# Altium footprint library ATK-DNN647_V1.0.PcbLib: 73 footprints (part 4 of 5)
Each footprint in its own frame and in the unit in brackets; x right, y up, seen from the top. Pads: shape width x height; smd on the part's side, far side on the other; paste and mask are expansions set on the pad; w line width, h text height; cw(c..) or ccw(c..) is an arc to the next point about the centre after c.
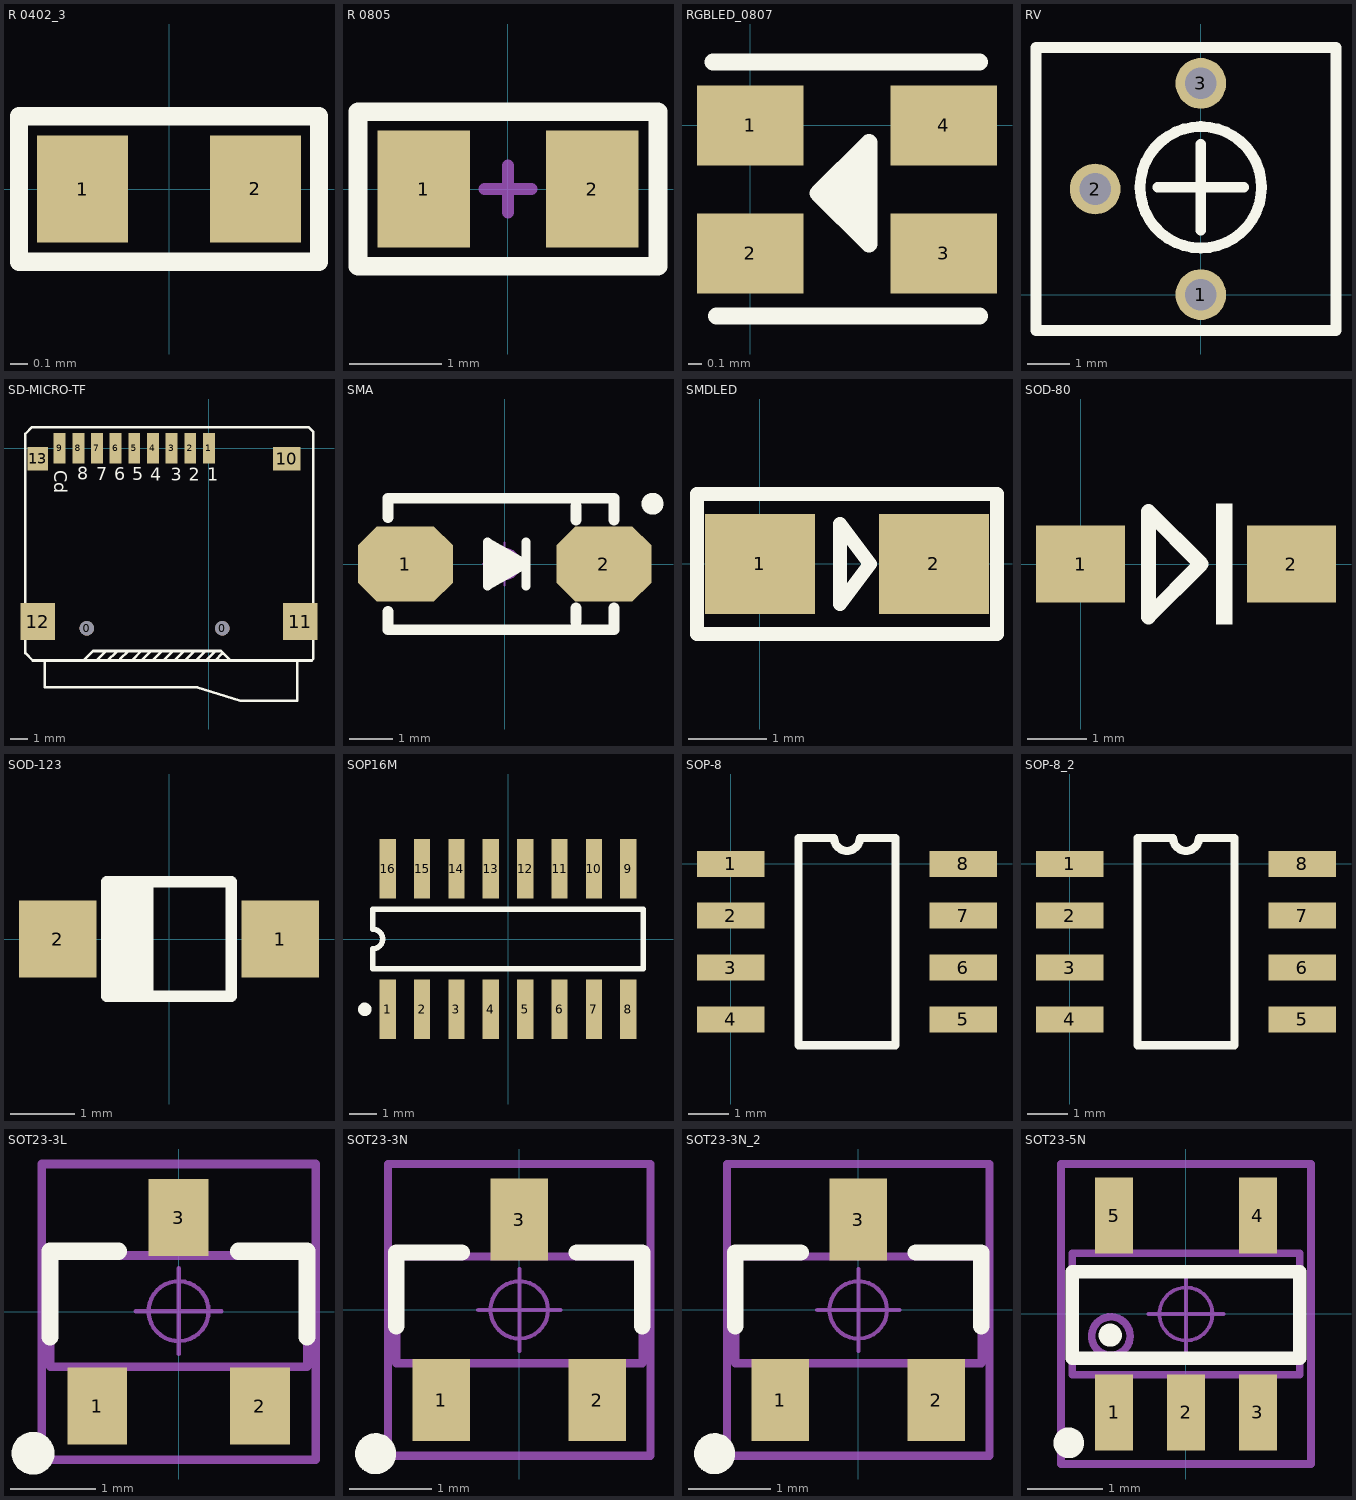
[diagram p3: the footprints below, top view; thin cyan lines are the x and y axes]

## R 0402_3 [mil]
pads (2):
  rect 20x23.62 smd mask+2: 1(-19,0) 2(19,0)
Top Overlay:
  lines w4: 7,-16 33,-16 33,16 7,16 ; 8,16 -33,16 -33,-16 9,-16
3D body "R0402.STEP": height 13.78, standoff 0, extent -19.69,-9.84 19.69,9.84

## R 0805 [mm] "1/8W贴片电阻"
pads (2):
  rect 1x1.27 smd: 1(-0.914,0) 2(0.914,0)
Top Overlay:
  lines w0.203: 0.406,-0.838 1.626,-0.838 1.626,0.838 0.406,0.838 ; 0.483,0.838 -1.626,0.838 -1.626,-0.838 0.533,-0.838
Mechanical 15:
  lines w0.127: -0.254,0 0.254,0 ; 0,-0.254 0,0.254
3D body "R0805.STEP": height 0.55, standoff 0, extent -0.873,-0.636 1.127,0.624

## RGBLED_0807 [mm] "0807, RGBLED, WS2812"
pads (4):
  rect 0.8x0.6 smd: 1(0,0) 2(0,-0.96) 3(1.45,-0.96) 4(1.45,0)
Top Overlay:
  region: 0.508,-0.508 0.889,-0.889 0.889,-0.127
  lines w0.127: -0.279,0.476 1.721,0.476 ; -0.254,-1.429 1.721,-1.429 ; 0.508,-0.508 0.889,-0.889 0.889,-0.127 0.508,-0.508

## RV [mm]
pads (3):
  round 1.2 hole 0.75: 1(0,0) 2(-2.5,2.5) 3(0,5)
Top Overlay:
  circle w0.254: c0,2.54 r1.437
  lines w0.254: -1.016,2.54 1.016,2.54 ; 0,1.524 0,3.556 ; -3.9,-0.85 3.2,-0.85 3.2,5.85 0,5.85 -3.9,5.85 -3.9,-0.85

## SD-MICRO-TF [mm]
pads (15):
  round 0.85 hole 0.85 unplated: 0(-7.2,-10.627) 0(0.8,-10.627)
  rect 0.7x1.8 smd: 1(0,0) 2(-1.1,0) 3(-2.2,0) 4(-3.3,0) 5(-4.4,0) 6(-5.5,0) 7(-6.6,0) 8(-7.7,0) 9(-8.8,0)
  rect 1.6x1.4 smd: 10(4.6,-0.627)
  rect 2.032x2.2 smd: 11(5.4,-10.227) 12(-10.1,-10.227)
  rect 1.2x1.4 smd: 13(-10.1,-0.627)
Top Overlay:
  lines w0.152: -9.677,-12.522 -9.677,-14.097 -0.686,-14.097 ; -6.629,-12.522 -6.096,-11.989 -6.096,-11.963 ; -5.969,-12.522 -5.461,-12.014 -5.461,-11.963 ; -5.232,-12.522 -5.232,-12.446 -4.75,-11.963 ; -4.547,-12.522 -3.988,-11.963 -3.962,-11.963 ; -3.962,-12.522 -3.429,-11.989 -3.429,-11.963 ; -3.327,-12.522 -2.769,-11.963 -2.667,-11.963 ; -2.667,-12.522 -2.108,-11.963 -2.083,-11.963 ; -2.032,-12.522 -1.499,-11.989 -1.499,-11.963 ; -1.397,-12.522 -0.838,-11.963 -0.711,-11.963 ; -0.762,-12.522 -0.203,-11.963 -0.178,-11.963 ; -0.711,-14.097 1.854,-14.91 5.207,-14.91 5.207,-12.548 ; -0.178,-12.522 0.381,-11.963 ; 0.381,-12.522 0.787,-12.116 0.864,-12.116 ; -10.389,-12.522 -7.391,-12.522 -6.833,-11.963 0.711,-11.963 1.27,-12.522 6.071,-12.522 ; -10.389,-12.522 6.071,-12.522 ; -10.389,-12.522 -10.82,-12.09 -10.82,0.855 -10.425,1.25 5.875,1.25 6.172,0.953 6.172,-12.421 6.071,-12.522
  text "Cd" at -9.119,-1.295 h0.76
  text "8" at -7.772,-1.854 h0.76
  text "7" at -6.655,-1.88 h0.76
  text "6" at -5.588,-1.88 h0.76
  text "5" at -4.521,-1.88 h0.76
  text "4" at -3.454,-1.905 h0.76
  text "3" at -2.261,-1.905 h0.76
  text "2" at -1.194,-1.905 h0.76
  text "1" at -0.102,-1.93 h0.76
3D body "sdcard.STEP": height 1.8, standoff -0.7, extent -10.372,-14.852 5.902,0.342

## SMA [mm] "4.5x2.6*2.2mm（长宽高，不包括引脚）"
height 2.54
pads (2):
  oct 2.2x1.75 smd: 1(-2.3,0) 2(2.3,0)
Top Overlay:
  circle w0.254: c3.429,1.397 r0.127
  lines w0.203: 0.494,-0.508 0.494,0.508 ; -0.395,-0.508 0.494,0 -0.395,0.508 -0.395,-0.508
  lines w0.254: -2.7,-1.105 -2.7,-1.524 2.54,-1.524 2.54,-1.016 ; -2.7,1.08 -2.7,1.524 2.54,1.524 2.54,1.016 ; -0.33,0.305 0.305,0 -0.254,-0.305 -0.254,0.051 0.023,0 ; 1.651,-1.35 1.651,-1.016 ; 1.651,1.016 1.651,1.35
Mechanical 15:
  circle w0.05: c0,0 r0.35
  lines w0.05: -0.5,0 0.5,0 ; 0,-0.5 0,0.5
3D body "SMA.STEP": height 2.15, standoff 0.04, extent -2.528,-1.3 2.574,1.3

## SMDLED [mm]
height 15
pads (2):
  rect 1.4x1.27 smd: 1(0.001,-0.002) 2(2.211,-0.002)
Top Overlay:
  lines w0.178: 3.012,0.887 3.011,0.887 ; 3.011,0.887 -0.799,0.887 -0.799,-0.002 -0.799,-0.891 3.011,-0.891 3.011,0.887 ; 1.017,-0.51 1.398,-0.002 1.017,0.506 1.017,-0.51

## SOD-80 [mm] "二极管 SOD-80"
pads (2):
  rect 1.5x1.3 smd: 1(0,0) 2(3.556,0)
Top Overlay:
  rectangle: 2.286,-1.015 2.559,1.017
  lines w0.254: 1.143,-0.889 2.032,0 1.143,0.889 1.143,-0.889
3D body "User Library-Diode MELF.STEP": height 1.55, standoff 0.05, extent 0.054,-0.763 3.553,0.737

## SOD-123 [mm]
height 1
pads (2):
  rect 1.2x1.2 smd: 1(1.73,0) 2(-1.73,0)
Top Overlay:
  rectangle: -0.968,-0.889 -0.333,0.889
  lines w0.178: -0.333,-0.889 -0.333,0.889 ; -0.968,-0.889 -0.968,0.889 0.968,0.889 0.968,0.445 0.968,-0.445 0.968,-0.889 -0.968,-0.889

## SOP16M [mm]
height 2
pads (16):
  rect 0.6x2.2 smd: 1(-4.445,-2.6) 2(-3.175,-2.6) 3(-1.905,-2.6) 4(-0.635,-2.6) 5(0.635,-2.6) 6(1.905,-2.6) 7(3.175,-2.6) 8(4.445,-2.6) 9(4.445,2.6) 10(3.175,2.6) 11(1.905,2.6) 12(0.635,2.6) 13(-0.635,2.6) 14(-1.905,2.6) 15(-3.175,2.6) 16(-4.445,2.6)
Top Overlay:
  circle w0.25: c-5.295,-2.6 r0.125
  lines w0.2: -5,-1.1 -5,-0.367 ccw(c-5,0) -5,0.367 -5,1.1 5,1.1 5,-1.1 -5,-1.1

## SOP-8 [mil] "SOP"
height 39.37
pads (8):
  rect 65x25 smd: 1(0,0) 2(0,-50) 3(0,-100) 4(0,-150) 5(224.41,-150) 6(224.41,-100) 7(224.41,-50) 8(224.41,0)
Top Overlay:
  lines w7.87: 65.37,-175 65.37,25 99.7,25 ccw(c112.2,25) 124.7,25 159.04,25 159.04,-175 65.37,-175

## SOP-8_2 [mil]
pads (8):
  rect 65x25 smd: 1(0,0) 2(0,-50) 3(0,-100) 4(0,-150) 5(224.41,-150) 6(224.41,-100) 7(224.41,-50) 8(224.41,0)
Top Overlay:
  lines w7.87: 65.37,-175 65.37,25 99.7,25 ccw(c112.2,25) 124.7,25 159.04,25 159.04,-175 65.37,-175

## SOT23-3L [mm] "3x1.3x1mm(长宽高)"
height 1.1
pads (3):
  rect 0.7x0.9 smd: 1(-0.95,-1.1) 2(0.95,-1.1) 3(0,1.1)
Top Overlay:
  circle w0.25: c-1.7,-1.651 r0.125
  lines w0.2: -1.5,-0.291 -1.5,0.709 -0.7,0.709 ; 0.7,0.709 1.5,0.709 1.5,-0.291
Mechanical 13:
  lines w0.1: -1.5,-0.641 -1.5,0.659 1.5,0.659 1.5,-0.641 -1.5,-0.641
Mechanical 15:
  circle w0.05: c0,0.009 r0.35
  lines w0.05: -0.5,0.009 0.5,0.009 ; 0,-0.491 0,0.509
  lines w0.1: -1.6,-1.727 -1.6,1.727 1.6,1.727 1.6,-1.727 -1.6,-1.727
3D body "SOT23-3.STEP": height 1.05, standoff 0, extent -1.5,-1.191 1.5,1.209

## SOT23-3N [mm] "3x1.3x1mm(长宽高)"
height 1.1
pads (3):
  rect 0.7x1 smd: 1(-0.95,-1.1) 2(0.95,-1.1) 3(0,1.1)
Top Overlay:
  circle w0.25: c-1.751,-1.753 r0.125
  lines w0.2: -1.501,-0.2 -1.501,0.7 -0.701,0.7 ; 0.699,0.7 1.499,0.7 1.499,-0.2
Mechanical 13:
  lines w0.1: -1.5,-0.65 1.5,-0.65 1.5,0.65 -1.5,0.65 -1.5,-0.65
Mechanical 15:
  circle w0.05: c0,0 r0.35
  lines w0.05: -0.5,0 0.5,0 ; 0,-0.5 0,0.5
  lines w0.1: -1.6,-1.778 1.6,-1.778 1.6,1.778 -1.6,1.778 -1.6,-1.778
3D body "SOT23-3.STEP": height 1.05, standoff 0, extent -1.5,-1.2 1.5,1.2

## SOT23-3N_2 [mm]
pads (3):
  rect 0.7x1 smd: 1(-0.95,-1.1) 2(0.95,-1.1) 3(0,1.1)
Top Overlay:
  circle w0.25: c-1.751,-1.753 r0.125
  lines w0.2: -1.501,-0.2 -1.501,0.7 -0.701,0.7 ; 0.699,0.7 1.499,0.7 1.499,-0.2
Mechanical 13:
  lines w0.1: -1.5,-0.65 1.5,-0.65 1.5,0.65 -1.5,0.65 -1.5,-0.65
Mechanical 15:
  circle w0.05: c0,0 r0.35
  lines w0.05: -0.5,0 0.5,0 ; 0,-0.5 0,0.5
  lines w0.1: -1.6,-1.778 1.6,-1.778 1.6,1.778 -1.6,1.778 -1.6,-1.778
3D body "SOT23-3.STEP": height 1.05, standoff 0, extent -1.5,-1.2 1.5,1.2

## SOT23-5N [mm] "3x1.6x1.1mm(长宽高)"
pads (5):
  rect 0.5x1 smd: 1(-0.95,-1.3) 2(0,-1.3) 3(0.95,-1.3) 4(0.95,1.3) 5(-0.95,1.3)
Top Overlay:
  circle w0.254: c-1.001,-0.279 r0.025
  circle w0.254: c-1.549,-1.702 r0.076
  lines w0.178: -1.5,-0.584 1.5,-0.584 1.5,0.559 -1.5,0.559 -1.5,-0.584
Mechanical 13:
  circle w0.1: c-0.992,-0.292 r0.254
  lines w0.1: -1.5,-0.8 1.5,-0.8 1.5,0.8 -1.5,0.8 -1.5,-0.8
Mechanical 15:
  circle w0.05: c0,0 r0.35
  lines w0.05: -0.5,0 0.5,0 ; 0,-0.5 0,0.5
  lines w0.1: -1.651,-1.981 -1.651,1.981 1.651,1.981 1.651,-1.981 -1.651,-1.981
3D body "SOT23-5.STEP": height 1.15, standoff -0.03, extent -1.5,-1.403 1.5,1.403